# Altium schematic symbol library Clema_FB.SchLib: 1 symbol
Pins are listed as number, name and electrical type; pins without a type are passive.

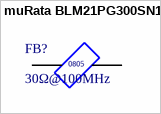
[diagram p0: symbol muRata BLM21PG300SN1D]

## muRata BLM21PG300SN1D
designator FB?, comment 30Ω@100MHz
FERRITE BEAD 30Ω 0805 1LN; Manufacturer: muRata; Manufacturer Part Number: BLM21PG300SN1D; Type: SMD; DigiKey Part Number: 490-1052-2-ND; LCSC Part Number: C16903; Mouser Part Number: 81-BLM21P300S; Package: 0805
footprint 30O@100MHz_0805
pins: 1, 2